# Altium schematic symbol library GRM1555C1H102JA01J.SchLib: 1 symbol
Pins are listed as number, name and electrical type; pins without a type are passive.

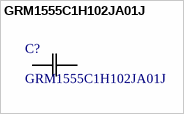
[diagram p0: symbol GRM1555C1H102JA01J]

## GRM1555C1H102JA01J
designator C?
Description; Manufacturer_Name: Murata; Copyright: Copyright (C) 2025 Ultra Librarian. All rights reserved.; Manufacturer_Part_Number: GRM1555C1H102JA01J
footprint G-155_MUR
pins: 1, 2